# EAGLE library part HR873168AE (library HR873168AE)
HanRun HR873168AE。チップ側 P1〜P5 (P3 は送受の中点タップを内部で共通)、中点タップ VC1+ (P7)・VC1− (P8)・VC2+ (P9)・VC2− (P10)、57 V・600 mA/タップ。LED は部品では 11-12 が緑、13-14 が黄 (11・13 がアノード) だが、記号のピン名は HR871150C と同じ色になるようにつないだ (YEL1・YEL2 → 13・14、GRN1・GRN2 → 11・12)。HR871150C の記号と入れ替えても配線と色はそのまま。Bob Smith 終端 (22 nF + 75 Ω × 4) と 1000 pF 2 kV (シールド) を内蔵。−40〜85 °C。
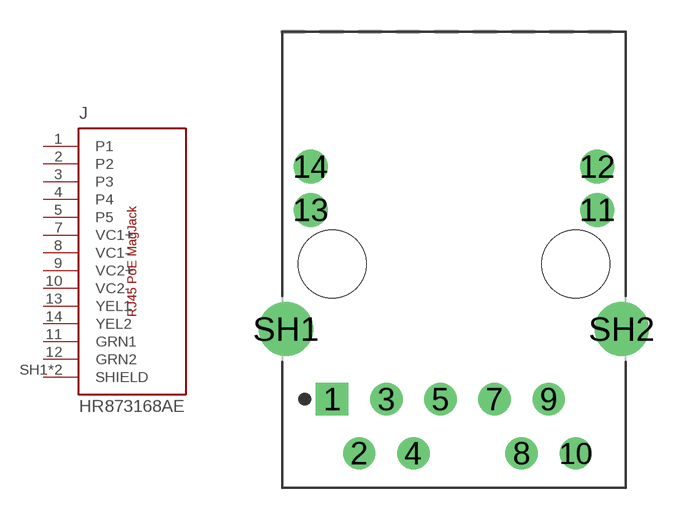
[diagram p0: symbol with the pads of RJ45-TH_HR873168AE; footprint RJ45-TH_HR873168AE]

Designator prefix J

## HR873168AE (LCSC: C19724783; MANUFACTURER: HanRun; MPN: HR873168AE)  [RJ45-TH_HR873168AE]
1  P1  pas
2  P2  pas
3  P3  pas
4  P4  pas
5  P5  pas
7  VC1+  pas
8  VC1-  pas
9  VC2+  pas
10  VC2-  pas
11  GRN1  pas
12  GRN2  pas
13  YEL1  pas
14  YEL2  pas
SH1  SHIELD  pas
SH2  SHIELD  pas

## Footprint RJ45-TH_HR873168AE (pad centres in mm)
HR873168AE。原点は位置決めの穴 (φ3.20、めっきなし) 2 つの中点。+y が差し込み口 (基板の端) の向きで、口の前面は y = +10.90、後ろは y = −10.50、幅 16.10。信号ピン φ0.89 (ピッチ 1.27 の千鳥、1・3・5・7・9 が y = −6.35、2・4・8・10 が y = −8.89、1 番が −x 側、6 番は無い)、LED ピン φ1.02 (11・12 が +x 側、13・14 が −x 側)、シールド φ1.70。
drill 0.9 pad 1.52 square: 1 -5.715,-6.35
drill 0.9 pad 1.52: 2 -4.445,-8.89; 3 -3.175,-6.35; 4 -1.905,-8.89; 5 -0.635,-6.35; 7 1.905,-6.35; 8 3.175,-8.89; 9 4.445,-6.35; 10 5.715,-8.89
drill 1.02 pad 1.6: 11 6.725,2.54; 12 6.725,4.57; 13 -6.725,2.54; 14 -6.725,4.57
drill 1.7 pad 2.5: SH1 -7.875,-3.05; SH2 7.875,-3.05
hole 3.2 at -5.715,0
hole 3.2 at 5.715,0